# Altium schematic symbol library 6130XX21821_61301221821.SchLib: 1 symbol
Pins are listed as number, name and electrical type; pins without a type are passive.

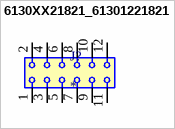
[diagram p0: symbol 6130XX21821_61301221821]

## 6130XX21821_61301221821
designator J?
MF: {'manufacturer': u'W\xfcrth Elektronik'}; MP: 61301221821; Package: None; Price: None; Value: *; Availability: Unavailable
footprint 61301221821
pins: 1, 2, 3, 4, 5, 6, 7, 8, 9, 10, 11, 12